# Altium footprint library Package_DFN_QFN.PcbLib: 735 footprints (part 4 of 46)
Each footprint in its own frame and in the unit in brackets; x right, y up, seen from the top. Pads: shape width x height; smd on the part's side, far side on the other; paste and mask are expansions set on the pad; w line width, h text height; cw(c..) or ccw(c..) is an arc to the next point about the centre after c.
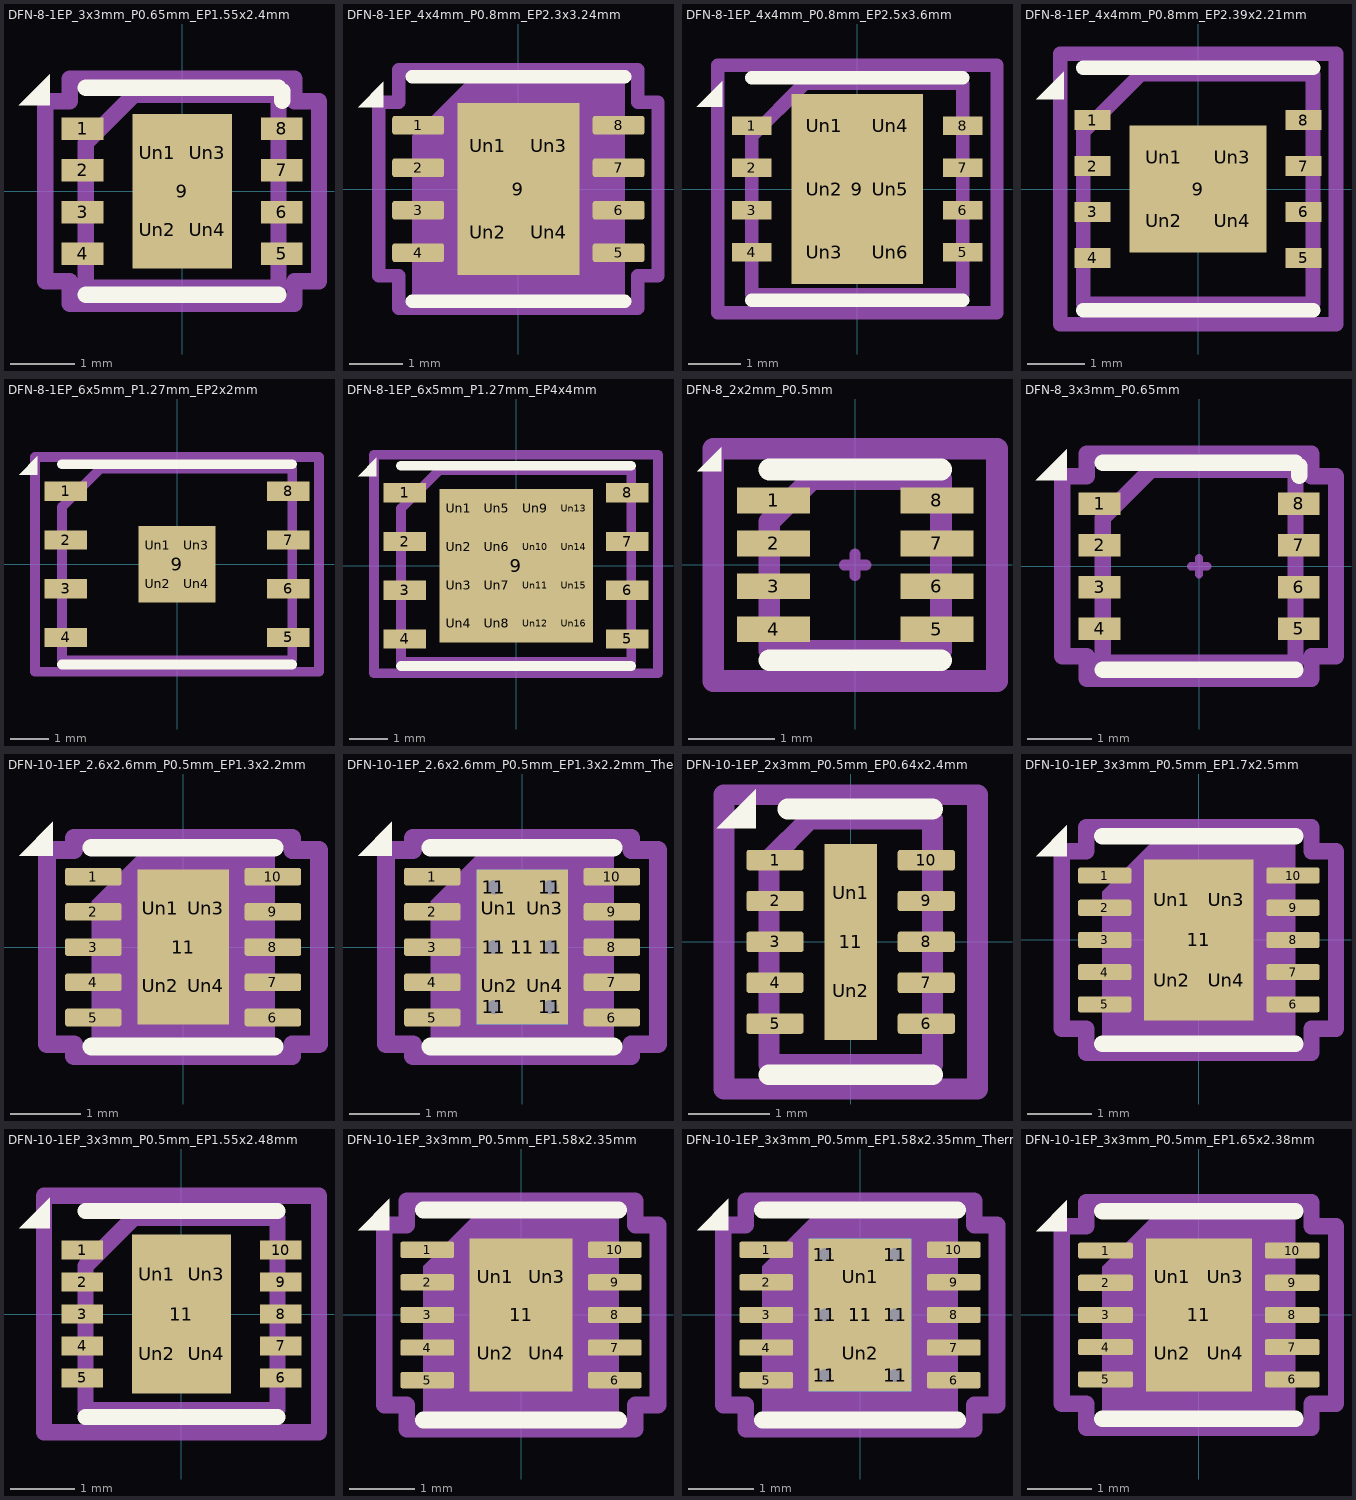
[diagram p3: the footprints below, top view; thin cyan lines are the x and y axes]

## DFN-8-1EP_3x3mm_P0.65mm_EP1.55x2.4mm [mm] "DFN-8-1EP_3x3mm_P0.65mm_EP1.55x2.4mm"
pads (13):
  rect 0.65x0.35 smd: 1(-1.55,0.975) 2(-1.55,0.325) 3(-1.55,-0.325) 4(-1.55,-0.975) 5(1.55,-0.975) 6(1.55,-0.325) 7(1.55,0.325) 8(1.55,0.975)
  rect 1.55x2.4 smd: 9(0,0)
  rect 0.6x1 on Top Paste: Un1(-0.387,0.6) Un2(-0.387,-0.6) Un3(0.387,0.6) Un4(0.387,-0.6)
F.SilkS:
  region: -2.06,1.34 -2.54,1.34 -2.06,1.82
  lines w0.254: -1.5,-1.61 1.5,-1.61 ; -1.5,1.61 1.5,1.61 ; 1.56,1.41 1.56,1.56
Top Component Center:
  lines w0.127: -0.127,0 0.127,0 -0.127,0 ; 0,-0.127 0,0.127 0,-0.127
Top Assembly:
  lines w0.254: -1.5,-1.5 1.5,-1.5 1.5,1.5 -0.75,1.5 -1.5,0.75 -1.5,-1.5
Top Courtyard:
  lines w0.254: -2.13,-1.4 -1.75,-1.4 -1.75,-1.75 1.75,-1.75 1.75,-1.4 2.13,-1.4 2.13,1.4 1.75,1.4 1.75,1.75 -1.75,1.75 -1.75,1.4 -2.13,1.4 -2.13,-1.4
Top Designator:
  text ".Designator" at -3.43,-0.344 h1.52
3D body "DFN-8-1EP_3x3mm_P0.65mm_EP1.55x2.4mm.step": height 0.77, standoff 0, extent -1.5,-1.49 1.5,1.49

## DFN-8-1EP_4x4mm_P0.8mm_EP2.3x3.24mm [mm] "DFN-8-1EP_4x4mm_P0.8mm_EP2.3x3.24mm"
pads (13):
  rrect25% 0.975x0.35 smd: 1(-1.887,1.2) 2(-1.887,0.4) 3(-1.887,-0.4) 4(-1.887,-1.2) 5(1.887,-1.2) 6(1.887,-0.4) 7(1.887,0.4) 8(1.887,1.2)
  rect 2.3x3.24 smd: 9(0,0)
  rrect25% 0.93x1.31 on Top Paste: Un1(-0.575,0.81) Un2(-0.575,-0.81) Un3(0.575,0.81) Un4(0.575,-0.81)
F.SilkS:
  region: -2.54,1.54 -3.02,1.54 -2.54,2.02
  lines w0.254: -2,-2.11 2,-2.11 ; -2,2.11 2,2.11
Top Component Center:
  lines w0.127: -0.127,0 0.127,0 -0.127,0 ; 0,-0.127 0,0.127 0,-0.127
Top Assembly:
  region: 2,-2 -2,-2 -2,1 -1,2 2,2
Top Courtyard:
  lines w0.254: -2.63,-1.63 -2.63,1.63 -2.25,1.63 -2.25,2.25 2.25,2.25 2.25,1.63 2.63,1.63 2.63,-1.63 2.25,-1.63 2.25,-2.25 -2.25,-2.25 -2.25,-1.63 -2.63,-1.63
Top Designator:
  text ".Designator" at -3.43,-0.344 h1.52
3D body "DFN-8-1EP_4x4mm_P0.8mm_EP2.5x3.6mm.step": height 0.92, standoff 0, extent -2,-1.99 2,1.99

## DFN-8-1EP_4x4mm_P0.8mm_EP2.5x3.6mm [mm] "DFN-8-1EP_4x4mm_P0.8mm_EP2.5x3.6mm"
pads (15):
  rect 0.75x0.35 smd: 1(-2,1.2) 2(-2,0.4) 3(-2,-0.4) 4(-2,-1.2) 5(2,-1.2) 6(2,-0.4) 7(2,0.4) 8(2,1.2)
  rect 2.5x3.6 smd: 9(0,0)
  rect 1x1 on Top Paste: Un1(-0.625,1.2) Un2(-0.625,0) Un3(-0.625,-1.2) Un4(0.625,1.2) Un5(0.625,0) Un6(0.625,-1.2)
F.SilkS:
  region: -2.56,1.56 -3.04,1.56 -2.56,2.04
  lines w0.254: -2,-2.11 2,-2.11 ; -2,2.11 2,2.11
Top Component Center:
  lines w0.127: -0.127,0 0.127,0 -0.127,0 ; 0,-0.127 0,0.127 0,-0.127
Top Assembly:
  lines w0.254: -2,-2 -2,1 -1,2 2,2 2,-2 -2,-2
Top Courtyard:
  lines w0.254: -2.65,-2.35 -2.65,2.35 2.65,2.35 2.65,-2.35 -2.65,-2.35
Top Designator:
  text ".Designator" at -3.43,-0.344 h1.52
3D body "DFN-8-1EP_4x4mm_P0.8mm_EP2.5x3.6mm.step": height 0.92, standoff 0, extent -2,-1.99 2,1.99

## DFN-8-1EP_4x4mm_P0.8mm_EP2.39x2.21mm [mm] "DFN-8-1EP_4x4mm_P0.8mm_EP2.39x2.21mm"
pads (13):
  rect 0.63x0.35 smd: 1(-1.835,1.2) 2(-1.835,0.4) 3(-1.835,-0.4) 4(-1.835,-1.2) 5(1.835,-1.2) 6(1.835,-0.4) 7(1.835,0.4) 8(1.835,1.2)
  rect 2.39x2.21 smd: 9(0,0)
  rect 0.83x0.77 on Top Paste: Un1(-0.597,0.553) Un2(-0.597,-0.553) Un3(0.597,0.553) Un4(0.597,-0.553)
F.SilkS:
  region: -2.34,1.56 -2.82,1.56 -2.34,2.04
  lines w0.254: -2,-2.11 2,-2.11 ; -2,2.11 2,2.11
Top Component Center:
  lines w0.127: -0.127,0 0.127,0 -0.127,0 ; 0,-0.127 0,0.127 0,-0.127
Top Assembly:
  lines w0.254: -2,-2 2,-2 2,2 -1,2 -2,1 -2,-2
Top Courtyard:
  lines w0.254: -2.4,-2.35 2.4,-2.35 2.4,2.35 -2.4,2.35 -2.4,-2.35
Top Designator:
  text ".Designator" at -3.43,-0.344 h1.52
3D body "DFN-8-1EP_4x4mm_P0.8mm_EP2.5x3.6mm.step": height 0.92, standoff 0, extent -2,-1.99 2,1.99

## DFN-8-1EP_6x5mm_P1.27mm_EP2x2mm [mm] "DFN-8-1EP_6x5mm_P1.27mm_EP2x2mm"
pads (13):
  rect 1.1x0.5 smd: 1(-2.9,1.905) 2(-2.9,0.635) 3(-2.9,-0.635) 4(-2.9,-1.905) 5(2.9,-1.905) 6(2.9,-0.635) 7(2.9,0.635) 8(2.9,1.905)
  rect 2x2 smd: 9(0,0)
  rect 0.8x0.8 on Top Paste: Un1(-0.5,0.5) Un2(-0.5,-0.5) Un3(0.5,0.5) Un4(0.5,-0.5)
F.SilkS:
  region: -3.64,2.34 -4.12,2.34 -3.64,2.82
  lines w0.254: -3,-2.61 3,-2.61 ; -3,2.61 3,2.61
Top Component Center:
  lines w0.127: -0.127,0 0.127,0 -0.127,0 ; 0,-0.127 0,0.127 0,-0.127
Top Assembly:
  lines w0.254: -3,-2.5 -3,1.5 -2,2.5 3,2.5 3,-2.5 -3,-2.5
Top Courtyard:
  lines w0.254: -3.7,-2.8 -3.7,2.8 3.7,2.8 3.7,-2.8 -3.7,-2.8
Top Designator:
  text ".Designator" at -3.43,-0.344 h1.52
3D body "DFN-8-1EP_6x5mm_P1.27mm_EP4x4mm.step": height 0.87, standoff 0, extent -3,-2.49 3,2.49

## DFN-8-1EP_6x5mm_P1.27mm_EP4x4mm [mm] "DFN-8-1EP_6x5mm_P1.27mm_EP4x4mm"
pads (25):
  rect 1.1x0.5 smd: 1(-2.9,1.905) 2(-2.9,0.635) 3(-2.9,-0.635) 4(-2.9,-1.905) 5(2.9,-1.905) 6(2.9,-0.635) 7(2.9,0.635) 8(2.9,1.905)
  rect 4x4 smd: 9(0,0)
  rect 0.8x0.8 on Top Paste: Un1(-1.5,1.5) Un2(-1.5,0.5) Un3(-1.5,-0.5) Un4(-1.5,-1.5) Un5(-0.5,1.5) Un6(-0.5,0.5) Un7(-0.5,-0.5) Un8(-0.5,-1.5) Un9(0.5,1.5) Un10(0.5,0.5) Un11(0.5,-0.5) Un12(0.5,-1.5) Un13(1.5,1.5) Un14(1.5,0.5) Un15(1.5,-0.5) Un16(1.5,-1.5)
F.SilkS:
  region: -3.64,2.34 -4.12,2.34 -3.64,2.82
  lines w0.254: -3,-2.61 3,-2.61 ; -3,2.61 3,2.61
Top Component Center:
  lines w0.127: -0.127,0 0.127,0 -0.127,0 ; 0,-0.127 0,0.127 0,-0.127
Top Assembly:
  lines w0.254: -3,-2.5 -3,1.5 -2,2.5 3,2.5 3,-2.5 -3,-2.5
Top Courtyard:
  lines w0.254: -3.7,-2.8 -3.7,2.9 3.7,2.9 3.7,-2.8 -3.7,-2.8
Top Designator:
  text ".Designator" at -3.43,-0.344 h1.52

## DFN-8_2x2mm_P0.5mm [mm] "DFN-8_2x2mm_P0.5mm"
pads (8):
  rect 0.85x0.3 smd: 1(-0.95,0.75) 2(-0.95,0.25) 3(-0.95,-0.25) 4(-0.95,-0.75) 5(0.95,-0.75) 6(0.95,-0.25) 7(0.95,0.25) 8(0.95,0.75)
F.SilkS:
  region: -1.56,1.09 -1.84,1.09 -1.56,1.37
  lines w0.254: -1,-1.11 1,-1.11 ; -1,1.11 1,1.11
Top Component Center:
  lines w0.127: -0.127,0 0.127,0 -0.127,0 ; 0,-0.127 0,0.127 0,-0.127
Top Assembly:
  lines w0.254: -1,-1 1,-1 1,1 -0.5,1 -1,0.5 -1,-1
Top Courtyard:
  lines w0.254: -1.65,-1.35 1.65,-1.35 1.65,1.35 -1.65,1.35 -1.65,-1.35
Top Designator:
  text ".Designator" at -2.251,-0.226 h1

## DFN-8_3x3mm_P0.65mm [mm] "DFN-8-1EP_3x3mm_P0.65mm"
pads (8):
  rect 0.65x0.35 smd: 1(-1.55,0.975) 2(-1.55,0.325) 3(-1.55,-0.325) 4(-1.55,-0.975) 5(1.55,-0.975) 6(1.55,-0.325) 7(1.55,0.325) 8(1.55,0.975)
F.SilkS:
  region: -2.06,1.34 -2.54,1.34 -2.06,1.82
  lines w0.254: -1.5,-1.61 1.5,-1.61 ; -1.5,1.61 1.5,1.61 ; 1.56,1.41 1.56,1.56
Top Component Center:
  lines w0.127: -0.127,0 0.127,0 -0.127,0 ; 0,-0.127 0,0.127 0,-0.127
Top Assembly:
  lines w0.254: -1.5,-1.5 1.5,-1.5 1.5,1.5 -0.75,1.5 -1.5,0.75 -1.5,-1.5
Top Courtyard:
  lines w0.254: -2.13,-1.4 -1.75,-1.4 -1.75,-1.75 1.75,-1.75 1.75,-1.4 2.13,-1.4 2.13,1.4 1.75,1.4 1.75,1.75 -1.75,1.75 -1.75,1.4 -2.13,1.4 -2.13,-1.4
Top Designator:
  text ".Designator" at -3.43,-0.344 h1.52
3D body "DFN-8-1EP_3x3mm_P0.65mm_EP1.55x2.4mm.step": height 0.77, standoff 0, extent -1.5,-1.49 1.5,1.49

## DFN-10-1EP_2.6x2.6mm_P0.5mm_EP1.3x2.2mm [mm] "DFN-10-1EP_2.6x2.6mm_P0.5mm_EP1.3x2.2mm"
pads (15):
  rrect25% 0.8x0.25 smd: 1(-1.275,1) 2(-1.275,0.5) 3(-1.275,0) 4(-1.275,-0.5) 5(-1.275,-1) 6(1.275,-1) 7(1.275,-0.5) 8(1.275,0) 9(1.275,0.5) 10(1.275,1)
  rect 1.3x2.2 smd: 11(0,0)
  rrect25% 0.52x0.89 on Top Paste: Un1(-0.325,0.55) Un2(-0.325,-0.55) Un3(0.325,0.55) Un4(0.325,-0.55)
F.SilkS:
  region: -1.85,1.3 -2.33,1.3 -1.85,1.78
  lines w0.254: -1.3,-1.41 1.3,-1.41 ; -1.3,1.41 1.3,1.41
Top Component Center:
  lines w0.127: -0.127,0 0.127,0 -0.127,0 ; 0,-0.127 0,0.127 0,-0.127
Top Assembly:
  region: 1.3,-1.3 -1.3,-1.3 -1.3,0.65 -0.65,1.3 1.3,1.3
Top Courtyard:
  lines w0.254: -1.93,-1.38 -1.55,-1.38 -1.55,-1.55 1.55,-1.55 1.55,-1.38 1.93,-1.38 1.93,1.38 1.55,1.38 1.55,1.55 -1.55,1.55 -1.55,1.38 -1.93,1.38 -1.93,-1.38
Top Designator:
  text ".Designator" at -2.251,-0.226 h1

## DFN-10-1EP_2.6x2.6mm_P0.5mm_EP1.3x2.2mm_ThermalVias [mm] "DFN-10-1EP_2.6x2.6mm_P0.5mm_EP1.3x2.2mm_ThermalVias"
pads (22):
  rrect25% 0.8x0.25 smd: 1(-1.275,1) 2(-1.275,0.5) 3(-1.275,0) 4(-1.275,-0.5) 5(-1.275,-1) 6(1.275,-1) 7(1.275,-0.5) 8(1.275,0) 9(1.275,0.5) 10(1.275,1)
  round 0.5 hole 0.2: 11(-0.4,-0.85) 11(-0.4,0) 11(-0.4,0.85) 11(0.4,-0.85) 11(0.4,0) 11(0.4,0.85)
  rect 1.3x2.2 smd: 11(0,0)
  rect 1.3x2.2 smd far side: 11(0,0)
  rrect25% 0.52x0.89 on Top Paste: Un1(-0.325,0.55) Un2(-0.325,-0.55) Un3(0.325,0.55) Un4(0.325,-0.55)
F.SilkS:
  region: -1.85,1.3 -2.33,1.3 -1.85,1.78
  lines w0.254: -1.3,-1.41 1.3,-1.41 ; -1.3,1.41 1.3,1.41
Top Component Center:
  lines w0.127: -0.127,0 0.127,0 -0.127,0 ; 0,-0.127 0,0.127 0,-0.127
Top Assembly:
  region: 1.3,-1.3 -1.3,-1.3 -1.3,0.65 -0.65,1.3 1.3,1.3
Top Courtyard:
  lines w0.254: -1.93,-1.38 -1.55,-1.38 -1.55,-1.55 1.55,-1.55 1.55,-1.38 1.93,-1.38 1.93,1.38 1.55,1.38 1.55,1.55 -1.55,1.55 -1.55,1.38 -1.93,1.38 -1.93,-1.38
Top Designator:
  text ".Designator" at -3.43,-0.344 h1.52

## DFN-10-1EP_2x3mm_P0.5mm_EP0.64x2.4mm [mm] "DFN-10-1EP_2x3mm_P0.5mm_EP0.64x2.4mm"
pads (13):
  rrect25% 0.7x0.25 smd: 1(-0.925,1) 2(-0.925,0.5) 3(-0.925,0) 4(-0.925,-0.5) 5(-0.925,-1) 6(0.925,-1) 7(0.925,-0.5) 8(0.925,0) 9(0.925,0.5) 10(0.925,1)
  rect 0.64x2.4 smd: 11(0,0)
  rrect25% 0.5x1 on Top Paste: Un1(0,0.6) Un2(0,-0.6)
F.SilkS:
  region: -1.16,1.39 -1.64,1.39 -1.16,1.87
  lines w0.254: -1,-1.625 1,-1.625 ; -0.77,1.625 1,1.625
Top Component Center:
  lines w0.127: -0.127,0 0.127,0 -0.127,0 ; 0,-0.127 0,0.127 0,-0.127
Top Assembly:
  lines w0.254: -1,-1.5 -1,1 -0.5,1.5 1,1.5 1,-1.5 -1,-1.5
Top Courtyard:
  lines w0.254: -1.55,-1.8 -1.55,1.8 1.55,1.8 1.55,-1.8 -1.55,-1.8
Top Designator:
  text ".Designator" at -2.251,-0.226 h1
3D body "DFN-10-1EP_2x3mm_P0.5mm_EP0.64x2.4mm.step": height 0.77, standoff 0, extent -1,-1.49 1,1.49

## DFN-10-1EP_3x3mm_P0.5mm_EP1.7x2.5mm [mm] "DFN-10-1EP_3x3mm_P0.5mm_EP1.7x2.5mm"
pads (15):
  rrect25% 0.825x0.25 smd: 1(-1.462,1) 2(-1.462,0.5) 3(-1.462,0) 4(-1.462,-0.5) 5(-1.462,-1) 6(1.462,-1) 7(1.462,-0.5) 8(1.462,0) 9(1.462,0.5) 10(1.462,1)
  rect 1.7x2.5 smd: 11(0,0)
  rrect25% 0.69x1.01 on Top Paste: Un1(-0.425,0.625) Un2(-0.425,-0.625) Un3(0.425,0.625) Un4(0.425,-0.625)
F.SilkS:
  region: -2.05,1.3 -2.53,1.3 -2.05,1.78
  lines w0.254: -1.5,-1.61 1.5,-1.61 ; -1.5,1.61 1.5,1.61
Top Component Center:
  lines w0.127: -0.127,0 0.127,0 -0.127,0 ; 0,-0.127 0,0.127 0,-0.127
Top Assembly:
  region: 1.5,-1.5 -1.5,-1.5 -1.5,0.75 -0.75,1.5 1.5,1.5
Top Courtyard:
  lines w0.254: -2.13,-1.38 -2.13,1.38 -1.75,1.38 -1.75,1.75 1.75,1.75 1.75,1.38 2.13,1.38 2.13,-1.38 1.75,-1.38 1.75,-1.75 -1.75,-1.75 -1.75,-1.38 -2.13,-1.38
Top Designator:
  text ".Designator" at -3.43,-0.344 h1.52
3D body "DFN-10-1EP_3x3mm_P0.5mm_EP1.55x2.48mm.step": height 0.77, standoff 0, extent -1.5,-1.49 1.5,1.49

## DFN-10-1EP_3x3mm_P0.5mm_EP1.55x2.48mm [mm] "DFN-10-1EP_3x3mm_P0.5mm_EP1.55x2.48mm"
pads (15):
  rect 0.65x0.3 smd: 1(-1.55,1) 2(-1.55,0.5) 3(-1.55,0) 4(-1.55,-0.5) 5(-1.55,-1) 6(1.55,-1) 7(1.55,-0.5) 8(1.55,0) 9(1.55,0.5) 10(1.55,1)
  rect 1.55x2.48 smd: 11(0,0)
  rect 0.6x1.05 on Top Paste: Un1(-0.387,0.62) Un2(-0.387,-0.62) Un3(0.387,0.62) Un4(0.387,-0.62)
F.SilkS:
  region: -2.06,1.34 -2.54,1.34 -2.06,1.82
  lines w0.254: -1.5,-1.61 1.5,-1.61 ; -1.5,1.61 1.5,1.61
Top Component Center:
  lines w0.127: -0.127,0 0.127,0 -0.127,0 ; 0,-0.127 0,0.127 0,-0.127
Top Assembly:
  lines w0.254: -1.5,-1.5 1.5,-1.5 1.5,1.5 -0.75,1.5 -1.5,0.75 -1.5,-1.5
Top Courtyard:
  lines w0.254: -2.15,-1.85 2.15,-1.85 2.15,1.85 -2.15,1.85 -2.15,-1.85
Top Designator:
  text ".Designator" at -3.43,-0.344 h1.52
3D body "DFN-10-1EP_3x3mm_P0.5mm_EP1.55x2.48mm.step": height 0.77, standoff 0, extent -1.5,-1.49 1.5,1.49

## DFN-10-1EP_3x3mm_P0.5mm_EP1.58x2.35mm [mm] "DFN-10-1EP_3x3mm_P0.5mm_EP1.58x2.35mm"
pads (15):
  rrect25% 0.825x0.25 smd: 1(-1.438,1) 2(-1.438,0.5) 3(-1.438,0) 4(-1.438,-0.5) 5(-1.438,-1) 6(1.438,-1) 7(1.438,-0.5) 8(1.438,0) 9(1.438,0.5) 10(1.438,1)
  rect 1.58x2.35 smd: 11(0,0)
  rrect25% 0.64x0.95 on Top Paste: Un1(-0.395,0.59) Un2(-0.395,-0.59) Un3(0.395,0.59) Un4(0.395,-0.59)
F.SilkS:
  region: -2.02,1.3 -2.5,1.3 -2.02,1.78
  lines w0.254: -1.5,-1.61 1.5,-1.61 ; -1.5,1.61 1.5,1.61
Top Component Center:
  lines w0.127: -0.127,0 0.127,0 -0.127,0 ; 0,-0.127 0,0.127 0,-0.127
Top Assembly:
  region: 1.5,-1.5 -1.5,-1.5 -1.5,0.75 -0.75,1.5 1.5,1.5
Top Courtyard:
  lines w0.254: -2.1,-1.38 -2.1,1.38 -1.75,1.38 -1.75,1.75 1.75,1.75 1.75,1.38 2.1,1.38 2.1,-1.38 1.75,-1.38 1.75,-1.75 -1.75,-1.75 -1.75,-1.38 -2.1,-1.38
Top Designator:
  text ".Designator" at -3.43,-0.344 h1.52
3D body "DFN-10-1EP_3x3mm_P0.5mm_EP1.55x2.48mm.step": height 0.77, standoff 0, extent -1.5,-1.49 1.5,1.49

## DFN-10-1EP_3x3mm_P0.5mm_EP1.58x2.35mm_ThermalVias [mm] "DFN-10-1EP_3x3mm_P0.5mm_EP1.58x2.35mm_ThermalVias"
pads (20):
  rrect25% 0.825x0.25 smd: 1(-1.438,1) 2(-1.438,0.5) 3(-1.438,0) 4(-1.438,-0.5) 5(-1.438,-1) 6(1.438,-1) 7(1.438,-0.5) 8(1.438,0) 9(1.438,0.5) 10(1.438,1)
  round 0.5 hole 0.2: 11(-0.54,-0.925) 11(-0.54,0) 11(-0.54,0.925) 11(0.54,-0.925) 11(0.54,0) 11(0.54,0.925)
  rect 1.58x2.35 smd: 11(0,0)
  rect 1.58x2.35 smd far side: 11(0,0)
  rrect25% 1.27x0.95 on Top Paste: Un1(0,0.59) Un2(0,-0.59)
F.SilkS:
  region: -2.02,1.3 -2.5,1.3 -2.02,1.78
  lines w0.254: -1.5,-1.61 1.5,-1.61 ; -1.5,1.61 1.5,1.61
Top Component Center:
  lines w0.127: -0.127,0 0.127,0 -0.127,0 ; 0,-0.127 0,0.127 0,-0.127
Top Assembly:
  region: 1.5,-1.5 -1.5,-1.5 -1.5,0.75 -0.75,1.5 1.5,1.5
Top Courtyard:
  lines w0.254: -2.1,-1.38 -2.1,1.38 -1.75,1.38 -1.75,1.75 1.75,1.75 1.75,1.38 2.1,1.38 2.1,-1.38 1.75,-1.38 1.75,-1.75 -1.75,-1.75 -1.75,-1.38 -2.1,-1.38
Top Designator:
  text ".Designator" at -3.43,-0.344 h1.52
3D body "DFN-10-1EP_3x3mm_P0.5mm_EP1.55x2.48mm.step": height 0.77, standoff 0, extent -1.5,-1.49 1.5,1.49

## DFN-10-1EP_3x3mm_P0.5mm_EP1.65x2.38mm [mm] "DFN-10-1EP_3x3mm_P0.5mm_EP1.65x2.38mm"
pads (15):
  rrect25% 0.85x0.25 smd: 1(-1.45,1) 2(-1.45,0.5) 3(-1.45,0) 4(-1.45,-0.5) 5(-1.45,-1) 6(1.45,-1) 7(1.45,-0.5) 8(1.45,0) 9(1.45,0.5) 10(1.45,1)
  rect 1.65x2.38 smd: 11(0,0)
  rrect25% 0.67x0.96 on Top Paste: Un1(-0.41,0.595) Un2(-0.41,-0.595) Un3(0.41,0.595) Un4(0.41,-0.595)
F.SilkS:
  region: -2.05,1.3 -2.53,1.3 -2.05,1.78
  lines w0.254: -1.5,-1.61 1.5,-1.61 ; -1.5,1.61 1.5,1.61
Top Component Center:
  lines w0.127: -0.127,0 0.127,0 -0.127,0 ; 0,-0.127 0,0.127 0,-0.127
Top Assembly:
  region: 1.5,-1.5 -1.5,-1.5 -1.5,0.75 -0.75,1.5 1.5,1.5
Top Courtyard:
  lines w0.254: -2.13,-1.38 -1.75,-1.38 -1.75,-1.75 1.75,-1.75 1.75,-1.38 2.13,-1.38 2.13,1.38 1.75,1.38 1.75,1.75 -1.75,1.75 -1.75,1.38 -2.13,1.38 -2.13,-1.38
Top Designator:
  text ".Designator" at -3.43,-0.344 h1.52
3D body "DFN-10-1EP_3x3mm_P0.5mm_EP1.65x2.38mm.step": height 0.76, standoff 0, extent -1.5,-1.488 1.5,1.488